# Altium footprint library Footprint-Lib-PhilsLab.PcbLib: 351 footprints (part 11 of 22)
Each footprint in its own frame and in the unit in brackets; x right, y up, seen from the top. Pads: shape width x height; smd on the part's side, far side on the other; paste and mask are expansions set on the pad; w line width, h text height; cw(c..) or ccw(c..) is an arc to the next point about the centre after c.
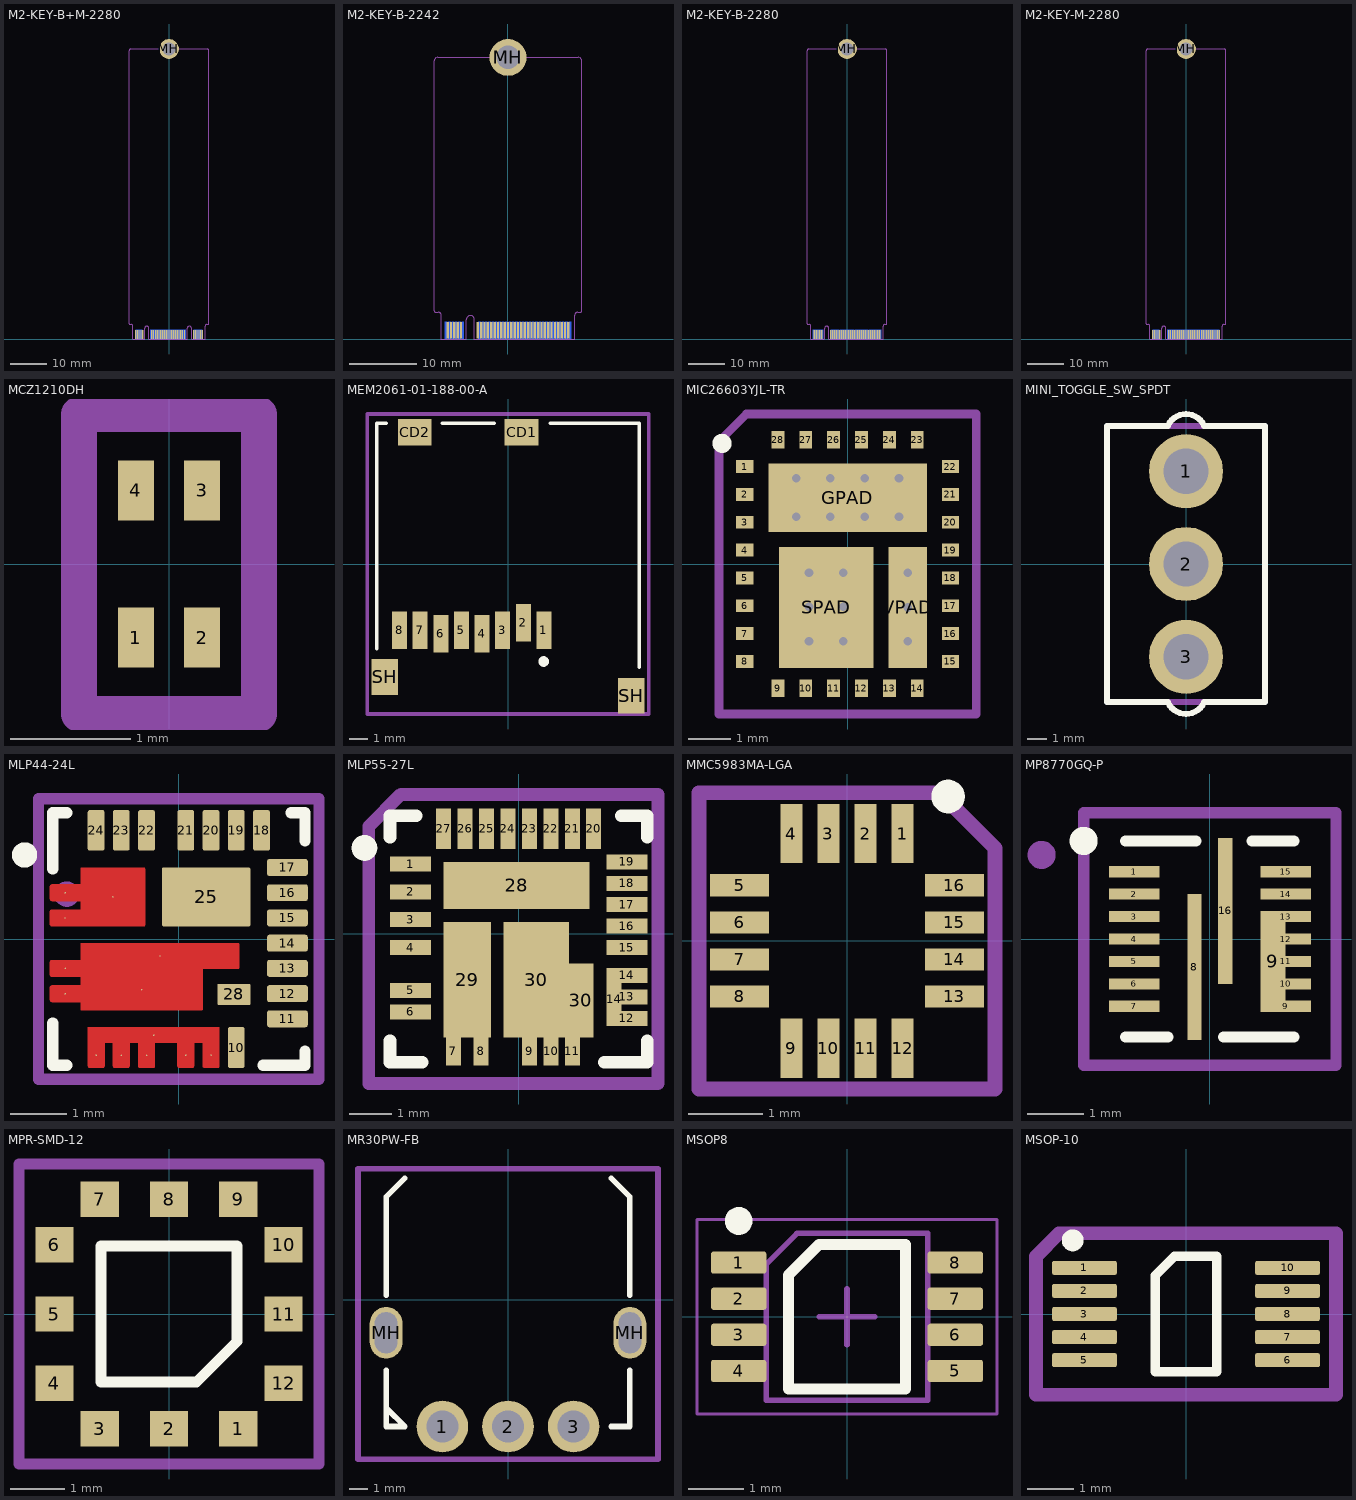
[diagram p10: the footprints below, top view; thin cyan lines are the x and y axes]

## M2-KEY-B+M-2280 [mm]
pads (60):
  rect 0.35x2.5 smd: 1(9.25,1.3) 3(8.75,1.3) 5(8.25,1.3) 7(7.75,1.3) 9(7.25,1.3) 11(6.75,1.3) 21(4.25,1.3) 23(3.75,1.3) 25(3.25,1.3) 27(2.75,1.3) 29(2.25,1.3) 31(1.75,1.3) 33(1.25,1.3) 35(0.75,1.3) 37(0.25,1.3) 39(-0.25,1.3) 41(-0.75,1.3) 43(-1.25,1.3) 45(-1.75,1.3) 47(-2.25,1.3) 49(-2.75,1.3) 51(-3.25,1.3) 53(-3.75,1.3) 55(-4.25,1.3) 57(-4.75,1.3) 67(-7.25,1.3) 69(-7.75,1.3) 71(-8.25,1.3) 73(-8.75,1.3) 75(-9.25,1.3)
  rect 0.35x2.5 smd far side: 2(9,1.3) 4(8.5,1.3) 6(8,1.3) 8(7.5,1.3) 10(7,1.3) 20(4.5,1.3) 22(4,1.3) 24(3.5,1.3) 26(3,1.3) 28(2.5,1.3) 30(2,1.3) 32(1.5,1.3) 34(1,1.3) 36(0.5,1.3) 38(0,1.3) 40(-0.5,1.3) 42(-1,1.3) 44(-1.5,1.3) 46(-2,1.3) 48(-2.5,1.3) 50(-3,1.3) 52(-3.5,1.3) 54(-4,1.3) 56(-4.5,1.3) 58(-5,1.3) 68(-7.5,1.3) 70(-8,1.3) 72(-8.5,1.3) 74(-9,1.3)
  round 5.5 hole 3.5: MH(0,80)
Mechanical 13:
  lines w0.1: -11,4.2 ccw(c-10.8,4.2) -10.8,4 -10.4,4 cw(c-10.4,3.55) -9.95,3.55 -9.95,0 -6.725,0 -6.725,2.9 cw(c-6.125,2.9) -5.525,2.9 -5.525,0 5.025,0 5.025,2.9 cw(c5.625,2.9) 6.225,2.9 6.225,0 9.95,0 9.95,3.55 cw(c10.4,3.55) 10.4,4 10.8,4 ccw(c10.8,4.2) 11,4.2 11,79.5 ccw(c10.5,79.5) 10.5,80 -10.5,80 ccw(c-10.5,79.5) -11,79.5 -11,4.2
  text "TOP" at -1.983,74.35 h1
  text "M" at -6.583,3.75 h1
  text "B" at 5.117,3.75 h1

## M2-KEY-B-2242 [mm]
pads (68):
  rect 0.35x2.5 smd far side: 1(-9.25,1.3) 3(-8.75,1.3) 5(-8.25,1.3) 7(-7.75,1.3) 9(-7.25,1.3) 11(-6.75,1.3) 21(-4.25,1.3) 23(-3.75,1.3) 25(-3.25,1.3) 27(-2.75,1.3) 29(-2.25,1.3) 31(-1.75,1.3) 33(-1.25,1.3) 35(-0.75,1.3) 37(-0.25,1.3) 39(0.25,1.3) 41(0.75,1.3) 43(1.25,1.3) 45(1.75,1.3) 47(2.25,1.3) 49(2.75,1.3) 51(3.25,1.3) 53(3.75,1.3) 55(4.25,1.3) 57(4.75,1.3) 59(5.25,1.3) 61(5.75,1.3) 63(6.25,1.3) 65(6.75,1.3) 67(7.25,1.3) 69(7.75,1.3) 71(8.25,1.3) 73(8.75,1.3) 75(9.25,1.3)
  rect 0.35x2.5 smd: 2(-9,1.3) 4(-8.5,1.3) 6(-8,1.3) 8(-7.5,1.3) 10(-7,1.3) 20(-4.5,1.3) 22(-4,1.3) 24(-3.5,1.3) 26(-3,1.3) 28(-2.5,1.3) 30(-2,1.3) 32(-1.5,1.3) 34(-1,1.3) 36(-0.5,1.3) 38(0,1.3) 40(0.5,1.3) 42(1,1.3) 44(1.5,1.3) 46(2,1.3) 48(2.5,1.3) 50(3,1.3) 52(3.5,1.3) 54(4,1.3) 56(4.5,1.3) 58(5,1.3) 60(5.5,1.3) 62(6,1.3) 64(6.5,1.3) 66(7,1.3) 68(7.5,1.3) 70(8,1.3) 72(8.5,1.3) 74(9,1.3)
  round 5.5 hole 3.5: MH(0,42)
Mechanical 13:
  lines w0.1: -6.2,0 -6.2,2.9 cw(c-5.6,2.9) -5,2.9 -5,0 9.95,0 9.95,3.55 cw(c10.4,3.55) 10.4,4 10.8,4 ccw(c10.8,4.2) 11,4.2 11,41.5 ccw(c10.5,41.5) 10.5,42 -10.5,42 ccw(c-10.5,41.5) -11,41.5 -11,4.2 ccw(c-10.8,4.2) -10.8,4 -10.4,4 cw(c-10.4,3.55) -9.95,3.55 -9.95,0 -6.209,0 -6.2,0.009
  text "TOP" at -1.983,36.35 h1

## M2-KEY-B-2280 [mm]
pads (68):
  rect 0.35x2.5 smd far side: 1(-9.25,1.3) 3(-8.75,1.3) 5(-8.25,1.3) 7(-7.75,1.3) 9(-7.25,1.3) 11(-6.75,1.3) 21(-4.25,1.3) 23(-3.75,1.3) 25(-3.25,1.3) 27(-2.75,1.3) 29(-2.25,1.3) 31(-1.75,1.3) 33(-1.25,1.3) 35(-0.75,1.3) 37(-0.25,1.3) 39(0.25,1.3) 41(0.75,1.3) 43(1.25,1.3) 45(1.75,1.3) 47(2.25,1.3) 49(2.75,1.3) 51(3.25,1.3) 53(3.75,1.3) 55(4.25,1.3) 57(4.75,1.3) 59(5.25,1.3) 61(5.75,1.3) 63(6.25,1.3) 65(6.75,1.3) 67(7.25,1.3) 69(7.75,1.3) 71(8.25,1.3) 73(8.75,1.3) 75(9.25,1.3)
  rect 0.35x2.5 smd: 2(-9,1.3) 4(-8.5,1.3) 6(-8,1.3) 8(-7.5,1.3) 10(-7,1.3) 20(-4.5,1.3) 22(-4,1.3) 24(-3.5,1.3) 26(-3,1.3) 28(-2.5,1.3) 30(-2,1.3) 32(-1.5,1.3) 34(-1,1.3) 36(-0.5,1.3) 38(0,1.3) 40(0.5,1.3) 42(1,1.3) 44(1.5,1.3) 46(2,1.3) 48(2.5,1.3) 50(3,1.3) 52(3.5,1.3) 54(4,1.3) 56(4.5,1.3) 58(5,1.3) 60(5.5,1.3) 62(6,1.3) 64(6.5,1.3) 66(7,1.3) 68(7.5,1.3) 70(8,1.3) 72(8.5,1.3) 74(9,1.3)
  round 5.5 hole 3.5: MH(0,80)
Mechanical 13:
  lines w0.1: -6.2,0 -6.2,2.9 cw(c-5.6,2.9) -5,2.9 -5,0 9.95,0 9.95,3.55 cw(c10.4,3.55) 10.4,4 10.8,4 ccw(c10.8,4.2) 11,4.2 11,79.5 ccw(c10.5,79.5) 10.5,80 -10.5,80 ccw(c-10.5,79.5) -11,79.5 -11,4.2 ccw(c-10.8,4.2) -10.8,4 -10.4,4 cw(c-10.4,3.55) -9.95,3.55 -9.95,0 -6.209,0 -6.2,0.009
  text "TOP" at -1.983,74.35 h1

## M2-KEY-M-2280 [mm]
pads (68):
  rect 0.35x2.5 smd: 1(9.25,1.3) 3(8.75,1.3) 5(8.25,1.3) 7(7.75,1.3) 9(7.25,1.3) 11(6.75,1.3) 13(6.25,1.3) 15(5.75,1.3) 17(5.25,1.3) 19(4.75,1.3) 21(4.25,1.3) 23(3.75,1.3) 25(3.25,1.3) 27(2.75,1.3) 29(2.25,1.3) 31(1.75,1.3) 33(1.25,1.3) 35(0.75,1.3) 37(0.25,1.3) 39(-0.25,1.3) 41(-0.75,1.3) 43(-1.25,1.3) 45(-1.75,1.3) 47(-2.25,1.3) 49(-2.75,1.3) 51(-3.25,1.3) 53(-3.75,1.3) 55(-4.25,1.3) 57(-4.75,1.3) 67(-7.25,1.3) 69(-7.75,1.3) 71(-8.25,1.3) 73(-8.75,1.3) 75(-9.25,1.3)
  rect 0.35x2.5 smd far side: 2(9,1.3) 4(8.5,1.3) 6(8,1.3) 8(7.5,1.3) 10(7,1.3) 12(6.5,1.3) 14(6,1.3) 16(5.5,1.3) 18(5,1.3) 20(4.5,1.3) 22(4,1.3) 24(3.5,1.3) 26(3,1.3) 28(2.5,1.3) 30(2,1.3) 32(1.5,1.3) 34(1,1.3) 36(0.5,1.3) 38(0,1.3) 40(-0.5,1.3) 42(-1,1.3) 44(-1.5,1.3) 46(-2,1.3) 48(-2.5,1.3) 50(-3,1.3) 52(-3.5,1.3) 54(-4,1.3) 56(-4.5,1.3) 58(-5,1.3) 68(-7.5,1.3) 70(-8,1.3) 72(-8.5,1.3) 74(-9,1.3)
  round 5.5 hole 3.5: MH(0,80)
Mechanical 13:
  lines w0.1: -11,4.2 ccw(c-10.8,4.2) -10.8,4 -10.4,4 cw(c-10.4,3.55) -9.95,3.55 -9.95,0 -6.725,0 -6.725,2.9 cw(c-6.125,2.9) -5.525,2.9 -5.525,0 6.225,0 9.95,0 9.95,3.55 cw(c10.4,3.55) 10.4,4 10.8,4 ccw(c10.8,4.2) 11,4.2 11,79.5 ccw(c10.5,79.5) 10.5,80 -10.5,80 ccw(c-10.5,79.5) -11,79.5 -11,4.2
  text "TOP" at -1.983,74.35 h1
  text "M" at -6.583,3.75 h1

## MCZ1210DH [mm]
pads (4):
  rect 0.3x0.5 smd mask+0.07: 1(-0.275,-0.613) 2(0.275,-0.613) 3(0.275,0.613) 4(-0.275,0.613)
Mechanical 13:
  lines w0.3: -0.75,-1.25 -0.75,0 -0.75,1.25 0.75,1.25 0.75,-1.25 -0.75,-1.25
  text "'.Designator'" at -5.84,-0.925 h1
3D body "MCZ1210DH.stp": height 0.7, standoff 0, extent -0.5,-0.833 0.5,0.833

## MEM2061-01-188-00-A [mm]
pads (12):
  rect 0.8x2 smd: 1(1.915,-3.525) 2(0.815,-3.125) 3(-0.285,-3.525) 4(-1.385,-3.725) 5(-2.485,-3.525) 6(-3.585,-3.725) 7(-4.685,-3.525) 8(-5.785,-3.525)
  rect 1.8x1.4 smd: CD1(0.725,7.025) CD2(-4.975,7.025)
  rect 1.4x1.9 smd: SH(-6.575,-6.025) SH(6.575,-7.025)
Top Overlay:
  circle w0.3: c1.9,-5.2 r0.131
  lines w0.2: -7,-4.5 -7,7.5 -6.5,7.5 ; -3.5,7.5 -0.75,7.5 ; 2.25,7.5 7,7.5 7,-5.5
Mechanical 13:
  circle w0.3: c1.9,-5.2 r0.105
  lines w0.2: -7.5,-8 0.5,-8 7.5,-8 7.5,8 -7.5,8 -7.5,-8
  text ".Designator" at -4.998,-0.333 h1
3D body "MEM2061-01-188-00-A.stp": height 1.94, standoff -0.01, extent -7.1,-7.675 7.1,7.775

## MIC26603YJL-TR [mm]
pads (31):
  rect 0.4x0.3 smd mask+0.07: 1(-2.4,2.275) 2(-2.4,1.625) 3(-2.4,0.975) 4(-2.4,0.325) 5(-2.4,-0.325) 6(-2.4,-0.975) 7(-2.4,-1.625) 8(-2.4,-2.275) 15(2.4,-2.275) 16(2.4,-1.625) 17(2.4,-0.975) 18(2.4,-0.325) 19(2.4,0.325) 20(2.4,0.975) 21(2.4,1.625) 22(2.4,2.275)
  rect 0.3x0.4 smd mask+0.07: 9(-1.625,-2.9) 10(-0.975,-2.9) 11(-0.325,-2.9) 12(0.325,-2.9) 13(0.975,-2.9) 14(1.625,-2.9) 23(1.625,2.9) 24(0.975,2.9) 25(0.325,2.9) 26(-0.325,2.9) 27(-0.975,2.9) 28(-1.625,2.9)
  rect 3.7x1.6 smd mask+0.07: GPAD(0,1.55)
  rect 2.2x2.83 smd mask+0.07: SPAD(-0.5,-1.015)
  rect 0.9x2.83 smd mask+0.07: VPAD(1.4,-1.015)
via 1.4,-1.8 diameter 0.5 hole 0.2
via 1.4,-1.015 diameter 0.5 hole 0.2
via 1.4,-0.2 diameter 0.5 hole 0.2
via -0.1,-1 diameter 0.5 hole 0.2
via -0.9,-1 diameter 0.5 hole 0.2
via -0.1,-0.2 diameter 0.5 hole 0.2
via -0.9,-0.2 diameter 0.5 hole 0.2
via -0.9,-1.8 diameter 0.5 hole 0.2
via -0.1,-1.8 diameter 0.5 hole 0.2
via 0.4,2 diameter 0.5 hole 0.2
via 0.4,1.1 diameter 0.5 hole 0.2
via 1.2,1.1 diameter 0.5 hole 0.2
via 1.2,2 diameter 0.5 hole 0.2
via -0.4,2 diameter 0.5 hole 0.2
via -0.4,1.1 diameter 0.5 hole 0.2
via -1.2,1.1 diameter 0.5 hole 0.2
via -1.2,2 diameter 0.5 hole 0.2
Top Overlay:
  circle w0.25: c-2.929,2.814 r0.098
Mechanical 13:
  lines w0.2: -3,-3.5 3,-3.5 3,3.5 -2.359,3.5 -3,2.859 -3,-3.5
  text "'.Designator'" at -5.148,-0.75 h0.8
3D body "MIC26603YJL-TR.stp": height 1, standoff 0, extent -2.5,-3 2.5,3

## MINI_TOGGLE_SW_SPDT [mm]
pads (3):
  round 3.75 hole 2.3: 1(0,4.7) 2(0,0) 3(0,-4.7)
Top Overlay:
  lines w0.3: -0.922,-7 -4,-7 -4,-0.5 -4,7 -0.922,7 ; -0.906,-7.023 ccw(c0,-6.6) 0.906,-7.023 ; -0.906,7.023 cw(c0,6.6) 0.906,7.023 ; 0.922,-7 4,-7 4,7 0.922,7
Mechanical 13:
  lines w0.3: -4,-7 4,-7 4,7 -4,7 -4,-7
  text "'.Designator'" at -5.815,-0.9 h1
3D body "Mini Toggle.step": height 27.29, standoff -3.93, extent -3.43,-6.35 3.43,6.35

## MLP44-24L [mm]
height 0.8
pads (30):
  round 0.025 smd mask+0.1: 1(-2.025,0.825) 2(-2.025,0.375) 3(-2.025,-0.525) 4(-2.025,-0.975) 5(-1.475,-2.075) 5(-0.45,-1.713) 6(-1.025,-2.075) 7(-0.575,-2.075) 8(0.125,-2.075) 9(0.575,-2.075)
  rrect25% 0.3x0.73 smd mask+0.1: 10(1.025,-1.935)
  rrect25% 0.725x0.3 smd mask+0.1: 11(1.937,-1.424) 12(1.937,-0.974) 13(1.937,-0.524) 14(1.937,-0.074) 15(1.937,0.376) 16(1.937,0.826) 17(1.937,1.276)
  rrect25% 0.3x0.725 smd mask+0.1: 18(1.475,1.938) 19(1.025,1.938) 20(0.575,1.938) 21(0.125,1.938) 22(-0.575,1.938) 23(-1.025,1.938) 24(-1.475,1.938)
  rrect5% 1.575x1.05 smd mask+0.07: 25(0.488,0.75)
  round 0.025 smd mask+0.102: 26(-1.175,0.75)
  round 0.025 smd mask+0.07: 27(-0.663,-0.902) 27(-0.338,-0.303)
  rrect5% 0.58x0.38 smd mask+0.07: 28(0.984,-0.989)
Top Layer:
  region: 1.063,-0.53 -1.751,-0.53 -1.751,-0.087 -1.751,-0.085 -1.749,-0.08 -1.746,-0.077 -1.741,-0.075 -1.739,-0.075 1.063,-0.075 1.065,-0.075 1.07,-0.077 1.073,-0.08 1.075,-0.085 1.075,-0.087 1.075,-0.519 1.075,-0.521 1.073,-0.526 1.07,-0.529 1.065,-0.53
  region: -1.732,-1.275 -1.736,-1.275 -1.742,-1.272 -1.748,-1.266 -1.751,-1.26 -1.751,-1.256 -1.751,-0.529 0.425,-0.529 0.425,-1.256 0.425,-1.26 0.422,-1.266 0.416,-1.272 0.41,-1.275 0.406,-1.275
  region: -2.263,-1.125 -2.27,-1.125 -2.284,-1.119 -2.294,-1.109 -2.3,-1.095 -2.3,-1.088 -2.3,-0.862 -2.3,-0.855 -2.294,-0.841 -2.284,-0.831 -2.27,-0.825 -2.263,-0.825 -1.75,-0.825 -1.75,-1.125
  region: -2.263,-0.675 -2.27,-0.675 -2.284,-0.669 -2.294,-0.659 -2.3,-0.645 -2.3,-0.638 -2.3,-0.412 -2.3,-0.405 -2.294,-0.391 -2.284,-0.381 -2.27,-0.375 -2.263,-0.375 -1.75,-0.375 -1.75,-0.675
  region: -2.263,0.225 -2.27,0.225 -2.284,0.231 -2.294,0.241 -2.3,0.255 -2.3,0.262 -2.3,0.488 -2.3,0.495 -2.294,0.509 -2.284,0.519 -2.27,0.525 -2.263,0.525 -1.75,0.525 -1.75,0.225
  region: -2.263,0.675 -2.27,0.675 -2.284,0.681 -2.294,0.691 -2.3,0.705 -2.3,0.712 -2.3,0.938 -2.3,0.945 -2.294,0.959 -2.284,0.969 -2.27,0.975 -2.263,0.975 -1.75,0.975 -1.75,0.675
  region: 0.725,-1.85 -1.625,-1.85 -1.625,-1.582 -1.625,-1.581 -1.624,-1.578 -1.622,-1.577 -1.619,-1.575 -1.618,-1.575 0.718,-1.575 0.719,-1.575 0.722,-1.577 0.724,-1.578 0.725,-1.581 0.725,-1.582
  region: -0.875,-2.263 -0.875,-2.27 -0.881,-2.284 -0.891,-2.294 -0.905,-2.3 -0.912,-2.3 -1.138,-2.3 -1.145,-2.3 -1.159,-2.294 -1.169,-2.284 -1.175,-2.27 -1.175,-2.263 -1.175,-1.85 -0.875,-1.85
  region: -0.425,-2.263 -0.425,-2.27 -0.431,-2.284 -0.441,-2.294 -0.455,-2.3 -0.462,-2.3 -0.688,-2.3 -0.695,-2.3 -0.709,-2.294 -0.719,-2.284 -0.725,-2.27 -0.725,-2.263 -0.725,-1.85 -0.425,-1.85
  region: 0.275,-2.263 0.275,-2.27 0.269,-2.284 0.259,-2.294 0.245,-2.3 0.238,-2.3 0.012,-2.3 0.005,-2.3 -0.009,-2.294 -0.019,-2.284 -0.025,-2.27 -0.025,-2.263 -0.025,-1.85 0.275,-1.85
  region: 0.725,-2.263 0.725,-2.27 0.719,-2.284 0.709,-2.294 0.695,-2.3 0.688,-2.3 0.462,-2.3 0.455,-2.3 0.441,-2.294 0.431,-2.284 0.425,-2.27 0.425,-2.263 0.425,-1.85 0.725,-1.85
  region: -1.325,-2.263 -1.325,-2.27 -1.331,-2.284 -1.341,-2.294 -1.355,-2.3 -1.362,-2.3 -1.588,-2.3 -1.595,-2.3 -1.609,-2.294 -1.619,-2.284 -1.625,-2.27 -1.625,-2.263 -1.625,-1.85 -1.325,-1.85
  region: -0.626,0.225 -1.75,0.225 -1.75,1.275 -0.626,1.275 -0.621,1.275 -0.611,1.271 -0.604,1.264 -0.6,1.254 -0.6,1.249 -0.6,0.251 -0.6,0.246 -0.604,0.236 -0.611,0.229 -0.621,0.225
Top Overlay:
  circle w0.25: c-2.75,1.5 r0.1
  lines w0.2: -2.25,-1.5 -2.25,-2.25 -2,-2.25 ; -2.25,1.25 -2.25,2.25 -2,2.25 ; 1.5,-2.25 2.25,-2.25 2.25,-2 ; 2,2.25 2.25,2.25 2.25,1.75
Mechanical 13:
  circle w0.25: c-2,0.8 r0.1
  lines w0.2: -2.5,-2.5 -2.5,2.5 2.5,2.5 2.5,-2.5 -2.5,-2.5
  text "'.Designator'" at -5.665,-0.417 h1
3D body "SIC438BED-T1-GE3.stp": height 0.9, standoff 0, extent -2,-2 2,2

## MLP55-27L [mm]
pads (32):
  rect 0.95x0.35 smd mask+0.1: 1(-2.525,1.625) 2(-2.525,0.975) 3(-2.525,0.325) 4(-2.525,-0.325) 5(-2.525,-1.325) 6(-2.525,-1.825) 12(2.525,-1.975) 13(2.525,-1.475) 14(2.525,-0.975) 15(2.525,-0.325) 16(2.525,0.175) 17(2.525,0.675) 18(2.525,1.175) 19(2.525,1.675)
  rect 0.35x0.65 smd mask+0.1: 7(-1.525,-2.75) 8(-0.875,-2.75) 9(0.255,-2.75) 10(0.755,-2.75) 11(1.255,-2.75)
  rect 0.35x0.95 smd mask+0.05: 14(2.225,-1.525)
  rect 0.35x0.95 smd mask+0.1: 20(1.75,2.45) 21(1.25,2.45) 22(0.75,2.45) 23(0.25,2.45) 24(-0.25,2.45) 25(-0.75,2.45) 26(-1.25,2.45) 27(-1.75,2.45)
  rect 3.4x1.1 smd mask+0.05: 28(-0.05,1.125)
  rect 1.1x2.7 smd mask+0.05: 29(-1.2,-1.075)
  rect 1.52x2.7 smd mask+0.05: 30(0.41,-1.075)
  rect 0.58x1.73 smd mask+0.05: 30(1.45,-1.56)
Top Overlay:
  circle w0.3: c-3.6,2 r0.15
  lines w0.3: -3,-2.5 -3,-3 -2.25,-3 ; -3,2.25 -3,2.75 -2.4,2.75 ; 2,-3 3,-3 3,-2.5 ; 2.4,2.75 3,2.75 3,2.25
Mechanical 13:
  lines w0.3: -3.5,-3.5 -3.5,2.5 -2.75,3.25 3.25,3.25 3.25,-3.5 -3.5,-3.5
  text "'.Designator'" at -6.315,-1.4 h1
3D body "MLP55-27L.STEP": height 0.8, standoff 0, extent -2.5,-2.575 2.501,2.425

## MMC5983MA-LGA [mm]
pads (16):
  rect 0.3x0.8 smd mask+0.05: 1(0.75,1.45) 2(0.25,1.45) 3(-0.25,1.45) 4(-0.75,1.45) 9(-0.75,-1.45) 10(-0.25,-1.45) 11(0.25,-1.45) 12(0.75,-1.45)
  rect 0.8x0.3 smd mask+0.05: 5(-1.45,0.75) 6(-1.45,0.25) 7(-1.45,-0.25) 8(-1.45,-0.75) 13(1.45,-0.75) 14(1.45,-0.25) 15(1.45,0.25) 16(1.45,0.75)
Top Overlay:
  circle w0.25: c1.364,1.95 r0.101
Mechanical 13:
  lines w0.2: -2,-2 -2,-0.25 -2,2 1.25,2 2,1.25 2,-2 -2,-2
3D body "MMC5983MA.step": height 0.99, standoff 0, extent -1.549,-1.549 1.549,1.549

## MP8770GQ-P [mm]
pads (17):
  rect 0.9x0.2 smd: 1(-1.35,1.2) 2(-1.35,0.8) 3(-1.35,0.4) 4(-1.35,0) 5(-1.35,-0.4) 6(-1.35,-0.8) 7(-1.35,-1.2) 9(1.35,-1.2) 10(1.35,-0.8) 11(1.35,-0.4) 12(1.35,0) 13(1.35,0.4) 14(1.35,0.8) 15(1.35,1.2)
  rect 0.25x2.6 smd: 8(-0.275,-0.5) 16(0.275,0.5)
  rect 0.45x1.8 smd: 9(1.125,-0.4)
Top Overlay:
  circle w0.3: c-2.25,1.75 r0.1
  lines w0.2: -1.5,-1.75 -0.75,-1.75 ; -1.5,1.75 -0.25,1.75 ; 0.25,-1.75 1.5,-1.75 ; 0.75,1.75 1.5,1.75
Mechanical 13:
  circle w0.3: c-3,1.5 r0.1
  lines w0.2: -2.25,-2.25 -2.25,2.25 2.25,2.25 2.25,-2.25 -2.25,-2.25
  text "'.Designator'" at -5.815,-0.9 h1
3D body "MP8770CGQ.step": height 0.86, standoff 0.01, extent -1.5,-1.5 1.5,1.5

## MPR-SMD-12 [mm]
pads (12):
  rect 0.7x0.65 smd mask+0.03: 1(1.27,-2.1) 2(0,-2.1) 3(-1.27,-2.1) 4(-2.1,-1.27) 5(-2.1,0) 6(-2.1,1.27) 7(-1.27,2.1) 8(0,2.1) 9(1.27,2.1) 10(2.1,1.27) 11(2.1,0) 12(2.1,-1.27)
Top Overlay:
  lines w0.2: -1.25,-1.25 0.5,-1.25 1.25,-0.5 1.25,1.25 -1.25,1.25 -1.25,-1.25
Mechanical 13:
  lines w0.2: -2.75,-2.75 2.75,-2.75 2.75,2.75 -2.75,2.75 -2.75,-2.75
  text "'.Designator'" at -5.84,-0.925 h1
3D body "MPRLS.stp": height 5.83, standoff 0.01, extent -2.444,-2.445 2.446,2.445

## MR30PW-FB [mm]
pads (5):
  round 2.75 hole 1.7: 1(-3.5,-6.75) 2(0,-6.75) 3(3.5,-6.75)
  oval 1.75x2.75 hole 1.2 slot 2.2 at 90 deg: MH(-6.5,-1.75) MH(6.5,-1.75)
Top Overlay:
  lines w0.3: -6.5,-3.75 -6.5,-6.75 -5.5,-6.75 -6.5,-5.75 ; -6.5,0.25 -6.5,5.5 -5.5,6.5 ; 5.5,-6.75 6.5,-6.75 6.5,-4 6.5,-3.75 ; 5.5,6.5 6.5,5.5 6.5,0.25 ; -6.5,-5.75 -6.5,-5.75
Mechanical 13:
  lines w0.3: -8,-8.5 -8,7 8,7 8,-8.5 -8,-8.5
  text "'.Designator'" at -5.84,-0.925 h1
3D body "MR30PW-FB.STEP": height 4.96, standoff -1.99, extent -7.7,-7.7 7.7,6.75

## MSOP8 [mm] "TSOP, 8-Leads, Body 2.90x2.80mm, Pitch 0.65mm, IPC Medium Density"
height 0.9
pads (8):
  rrect25% 1x0.4 smd mask+0.05: 1(-1.95,0.975) 2(-1.95,0.325) 3(-1.95,-0.325) 4(-1.95,-0.975) 5(1.95,-0.975) 6(1.95,-0.325) 7(1.95,0.325) 8(1.95,0.975)
Top Overlay:
  circle w0.25: c-1.95,1.725 r0.125
  lines w0.2: -1.05,-1.3 -1.05,0.75 -0.5,1.3 1.05,1.3 1.05,-1.3 -1.05,-1.3
Mechanical 13:
  lines w0.1: -1.45,-1.5 1.45,-1.5 1.45,1.5 -0.9,1.5 -1.45,0.95 -1.45,-1.5
  text "'.Designator'" at -5.815,-0.9 h1
Mechanical 15:
  lines w0.05: -2.7,-1.75 2.7,-1.75 2.7,1.75 -2.7,1.75 -2.7,-1.75
  lines w0.1: -0.5,0 0.5,0 ; 0,-0.5 0,0.5
3D body "MSOP8.step": height 0.9, standoff 0, extent -2,-1.5 2,1.5

## MSOP-10 [mm]
pads (10):
  rrect25% 1.4x0.3 smd mask+0.05: 1(-2.2,1) 2(-2.2,0.5) 3(-2.2,0) 4(-2.2,-0.5) 5(-2.2,-1) 6(2.2,-1) 7(2.2,-0.5) 8(2.2,0) 9(2.2,0.5) 10(2.2,1)
Top Overlay:
  circle w0.254: c-2.456,1.596 r0.109
  lines w0.2: -0.665,-1.25 -0.665,0.835 -0.25,1.25 0.125,1.25 0.665,1.25 0.665,-1.25 -0.665,-1.25
Mechanical 13:
  lines w0.3: -3.25,-1.75 -3.25,1.25 -2.75,1.75 3.25,1.75 3.25,-1.75 -3.25,-1.75
  text "'.Designator'" at -7.231,-1.087 h1.25
3D body "MSOP-10.step": height 1.15, standoff 0, extent -2.45,-1.5 2.45,1.5